# EAGLE library part D15S13A4PA00LF (library D15S13A4PA00LF)
15 Position D-Sub Receptacle, Female Sockets Connector 2 (DA, A) 300V -55C ~ 125C Source: Datasheet <https://cdn.amphenol-cs.com/media/wysiwyg/files/drawing/c01-8646-0304.pdf>
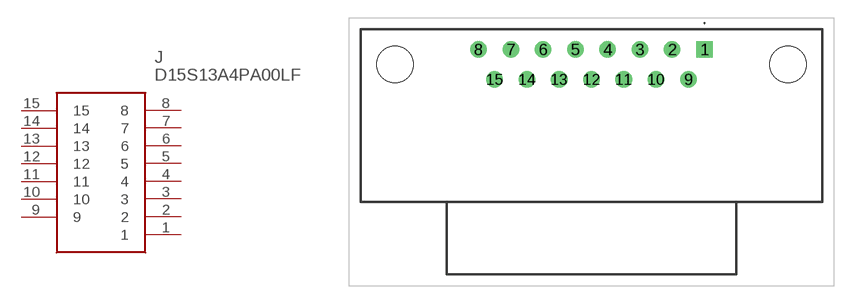
[diagram p0: symbol with the pads of D15S13A4PA00LF; footprint D15S13A4PA00LF]

Designator prefix J

## D15S13A4PA00LF (Description: 15 Position D-Sub Receptacle, Female Sockets Connector 2 (DA, A) 300V -55C ~ 125C; Height: 13.86mm; Manufacturer_Name: Amphenol Communications Solutions; Manufacturer_Part_Number: D15S13A4PA00LF)  [D15S13A4PA00LF]
1  1
2  2
3  3
4  4
5  5
6  6
7  7
8  8
9  9
10  10
11  11
12  12
13  13
14  14
15  15

## Footprint D15S13A4PA00LF (pad centres in mm)
D15S13A4PA00LF-1
drill 0.9 pad 1.4 square: 1 0,0
drill 0.9 pad 1.4: 2 -2.74,0; 3 -5.48,0; 4 -8.22,0; 5 -10.96,0; 6 -13.7,0; 7 -16.44,0; 8 -19.18,0; 9 -1.37,-2.54; 10 -4.11,-2.54; 11 -6.85,-2.54; 12 -9.59,-2.54; 13 -12.33,-2.54; 14 -15.07,-2.54; 15 -17.81,-2.54
hole 3.1 at 7.07,-1.27
hole 3.1 at -26.25,-1.27